# Altium footprint library CoilcraftPCB.PcbLib: 320 footprints (part 8 of 20)
Each footprint in its own frame and in the unit in brackets; x right, y up, seen from the top. Pads: shape width x height; smd on the part's side, far side on the other; paste and mask are expansions set on the pad; w line width, h text height; cw(c..) or ccw(c..) is an arc to the next point about the centre after c.
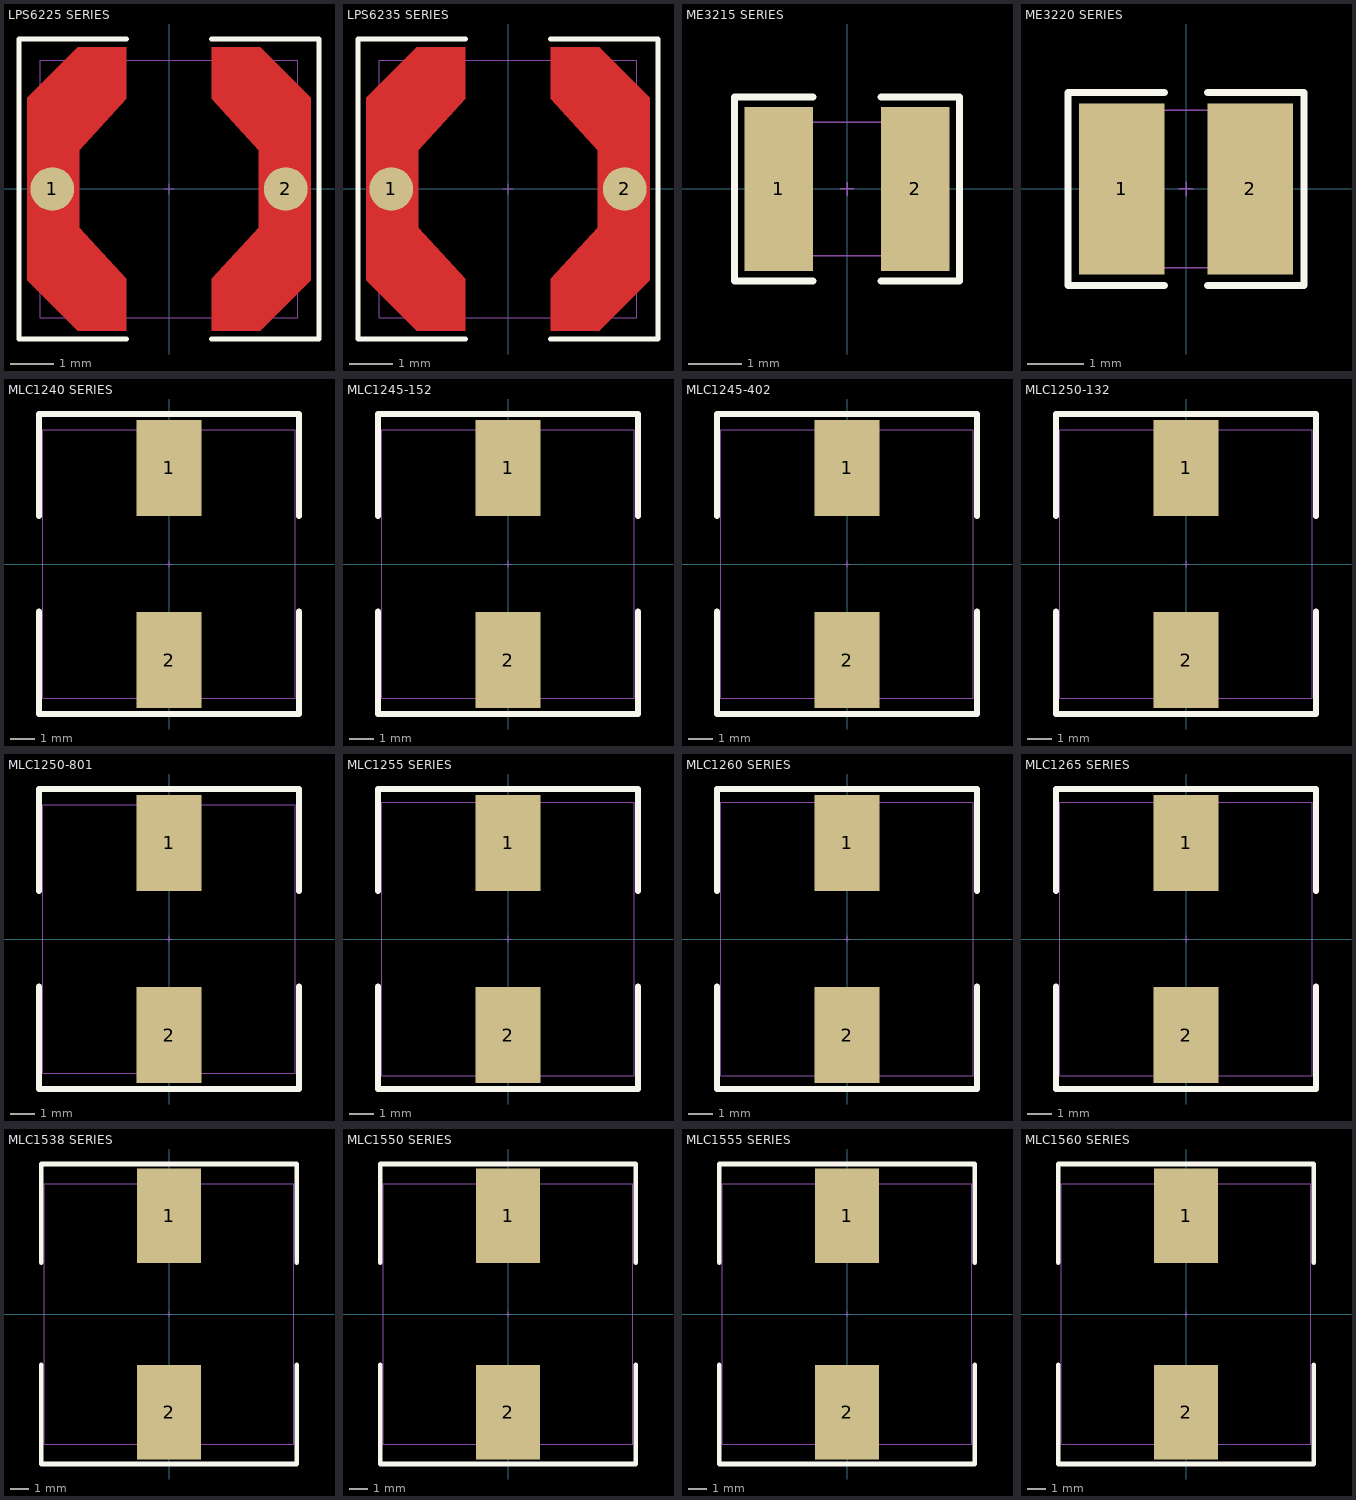
[diagram p7: the footprints below, top view; thin cyan lines are the x and y axes]

## LPS6225 SERIES [mil] "Coilcraft Shielded SMT Power Inductors"
height 94
pads (2):
  round 40 smd mask+0: 1(-107,0) 2(107,0)
Top Layer:
  region: 39,82.5 39,130 83.5,130 130,83.5 130,-83.5 83.5,-130 39,-130 39,-82.5 82.5,-35.5 82.5,35.5
  region: -39,-82.5 -39,-130 -83.5,-130 -130,-83.5 -130,83.5 -83.5,130 -39,130 -39,82.5 -82.5,35.5 -82.5,-35.5
Top Overlay:
  lines w5: -39,-137.5 -137.5,-137.5 -137.5,137.5 -39,137.5 ; 39,-137.5 137.5,-137.5 137.5,137.5 39,137.5
Top Paste:
  region: -39,-82.5 -39,-130 -83.5,-130 -130,-83.5 -130,83.5 -83.5,130 -39,130 -39,82.5 -82.5,35.5 -82.5,-35.5
  region: 39,82.5 39,130 83.5,130 130,83.5 130,-83.5 83.5,-130 39,-130 39,-82.5 82.5,-35.5 82.5,35.5
Mechanical 13:
  lines w1: -5,0 5,0 ; 0,-5 0,5
Mechanical 14:
  lines w1: -118,-118 -118,118 118,118 118,-118 -118,-118
3D body: height 98.43, standoff 0, extent -122.16,-122.16 122.17,122.17

## LPS6235 SERIES [mil] "Coilcraft Shielded SMT Power Inductors"
height 138
pads (2):
  round 40 smd mask+0: 1(-107,0) 2(107,0)
Top Layer:
  region: 39,82.5 39,130 83.5,130 130,83.5 130,-83.5 83.5,-130 39,-130 39,-82.5 82.5,-35.5 82.5,35.5
  region: -39,-82.5 -39,-130 -83.5,-130 -130,-83.5 -130,83.5 -83.5,130 -39,130 -39,82.5 -82.5,35.5 -82.5,-35.5
Top Overlay:
  lines w5: -39,-137.5 -137.5,-137.5 -137.5,137.5 -39,137.5 ; 39,-137.5 137.5,-137.5 137.5,137.5 39,137.5
Top Paste:
  region: -39,-82.5 -39,-130 -83.5,-130 -130,-83.5 -130,83.5 -83.5,130 -39,130 -39,82.5 -82.5,35.5 -82.5,-35.5
  region: 39,82.5 39,130 83.5,130 130,83.5 130,-83.5 83.5,-130 39,-130 39,-82.5 82.5,-35.5 82.5,35.5
Mechanical 13:
  lines w1: -5,0 5,0 ; 0,-5 0,5
Mechanical 14:
  lines w1: -118,-118 -118,118 118,118 118,-118 -118,-118
3D body: height 137.8, standoff 0, extent -122.16,-122.16 122.17,122.17

## ME3215 SERIES [mil] "Coilcraft SMT Power Inductors"
height 61
pads (2):
  rect 50x120 smd: 1(-50,0) 2(50,0)
Top Overlay:
  lines w5: -25,-67.5 -82.5,-67.5 -82.5,67.5 -25,67.5 ; 25,-67.5 82.5,-67.5 82.5,67.5 25,67.5
Mechanical 13:
  lines w1: -5,0 5,0 ; 0,-5 0,5
Mechanical 14:
  lines w1: -63,-49 -63,49 63,49 63,-49 -63,-49
3D body: height 61.06, standoff 0.03, extent -68.9,-49.21 68.89,49.22

## ME3220 SERIES [mil] "Coilcraft SMT Power Inductors"
height 79
pads (2):
  rect 60x120 smd: 1(-45,0) 2(45,0)
Top Overlay:
  lines w5: -15,-67.5 -82.5,-67.5 -82.5,67.5 -15,67.5 ; 15,-67.5 82.5,-67.5 82.5,67.5 15,67.5
Mechanical 13:
  lines w1: -5,0 5,0 ; 0,-5 0,5
Mechanical 14:
  lines w1: -63,-55 -63,55 63,55 63,-55 -63,-55
3D body: height 94.52, standoff 0.03, extent -68.9,-55.11 68.89,55.12

## MLC1240 SERIES [mm] "Coilcraft Shielded Power Inductors"
height 4.1
pads (2):
  rect 2.7x4 smd: 1(0,4) 2(0,-4)
Top Overlay:
  lines w0.254: -5.41,-1.981 -5.41,-6.248 5.41,-6.248 5.41,-1.981 ; -5.41,2.007 -5.41,6.248 5.41,6.248 5.41,2.007
Mechanical 13:
  lines w0.025: -0.127,0 0.127,0 ; 0,-0.127 0,0.127
Mechanical 14:
  lines w0.025: -5.25,-5.6 5.25,-5.6 5.25,5.6 -5.25,5.6 -5.25,-5.6
3D body: height 4.03, standoff 0.02, extent -5.25,-5.6 5.25,5.6

## MLC1245-152 [mm] "Coilcraft Shielded Power Inductors"
height 4.6
pads (2):
  rect 2.7x4 smd: 1(0,4) 2(0,-4)
Top Overlay:
  lines w0.254: -5.41,-1.981 -5.41,-6.248 5.41,-6.248 5.41,-1.981 ; -5.41,2.007 -5.41,6.248 5.41,6.248 5.41,2.007
Mechanical 13:
  lines w0.025: -0.127,0 0.127,0 ; 0,-0.127 0,0.127
Mechanical 14:
  lines w0.025: -5.25,-5.6 5.25,-5.6 5.25,5.6 -5.25,5.6 -5.25,-5.6
3D body: height 4.53, standoff 0.02, extent -5.25,-5.6 5.25,5.6

## MLC1245-402 [mm] "Coilcraft Shielded Power Inductors"
height 4.8
pads (2):
  rect 2.7x4 smd: 1(0,4) 2(0,-4)
Top Overlay:
  lines w0.254: -5.41,-1.981 -5.41,-6.248 5.41,-6.248 5.41,-1.981 ; -5.41,2.007 -5.41,6.248 5.41,6.248 5.41,2.007
Mechanical 13:
  lines w0.025: -0.127,0 0.127,0 ; 0,-0.127 0,0.127
Mechanical 14:
  lines w0.025: -5.25,-5.6 -5.25,5.6 5.25,5.6 5.25,-5.6 -5.25,-5.6
3D body: height 4.53, standoff 0.02, extent -5.25,-5.6 5.25,5.6

## MLC1250-132 [mm] "Coilcraft Shielded Power Inductors"
height 5.3
pads (2):
  rect 2.7x4 smd: 1(0,4) 2(0,-4)
Top Overlay:
  lines w0.254: -5.41,-1.981 -5.41,-6.248 5.41,-6.248 5.41,-1.981 ; -5.41,2.007 -5.41,6.248 5.41,6.248 5.41,2.007
Mechanical 13:
  lines w0.025: -0.127,0 0.127,0 ; 0,-0.127 0,0.127
Mechanical 14:
  lines w0.025: -5.25,-5.6 5.25,-5.6 5.25,5.6 -5.25,5.6 -5.25,-5.6
3D body: height 5.03, standoff 0.02, extent -5.25,-5.6 5.25,5.6

## MLC1250-801 [mm] "Coilcraft Shielded Power Inductors"
height 5.1
pads (2):
  rect 2.7x4 smd: 1(0,4) 2(0,-4)
Top Overlay:
  lines w0.254: -5.41,-1.981 -5.41,-6.248 5.41,-6.248 5.41,-1.981 ; -5.41,2.007 -5.41,6.248 5.41,6.248 5.41,2.007
Mechanical 13:
  lines w0.025: -0.127,0 0.127,0 ; 0,-0.127 0,0.127
Mechanical 14:
  lines w0.025: -5.25,-5.6 5.25,-5.6 5.25,5.6 -5.25,5.6 -5.25,-5.6
3D body: height 5.03, standoff 0.02, extent -5.25,-5.6 5.25,5.6

## MLC1255 SERIES [mm] "Coilcraft Shielded Power Inductors"
height 5.6
pads (2):
  rect 2.7x4 smd: 1(0,4) 2(0,-4)
Top Overlay:
  lines w0.254: -5.41,-1.981 -5.41,-6.248 5.41,-6.248 5.41,-1.981 ; -5.41,2.007 -5.41,6.248 5.41,6.248 5.41,2.007
Mechanical 13:
  lines w0.025: -0.127,0 0.127,0 ; 0,-0.127 0,0.127
Mechanical 14:
  lines w0.025: -5.25,-5.7 5.25,-5.7 5.25,5.7 -5.25,5.7 -5.25,-5.7
3D body: height 5.53, standoff 0.02, extent -5.25,-5.7 5.25,5.7

## MLC1260 SERIES [mm] "Coilcraft Shielded Power Inductors"
height 6.1
pads (2):
  rect 2.7x4 smd: 1(0,4) 2(0,-4)
Top Overlay:
  lines w0.254: -5.41,-1.981 -5.41,-6.248 5.41,-6.248 5.41,-1.981 ; -5.41,2.007 -5.41,6.248 5.41,6.248 5.41,2.007
Mechanical 13:
  lines w0.025: -0.127,0 0.127,0 ; 0,-0.127 0,0.127
Mechanical 14:
  lines w0.025: -5.25,-5.7 5.25,-5.7 5.25,5.7 -5.25,5.7 -5.25,-5.7
3D body: height 6.03, standoff 0.02, extent -5.25,-5.7 5.25,5.7

## MLC1265 SERIES [mm] "Coilcraft Shielded Power Inductors"
height 6.5
pads (2):
  rect 2.7x4 smd: 1(0,4) 2(0,-4)
Top Overlay:
  lines w0.254: -5.41,-1.981 -5.41,-6.248 5.41,-6.248 5.41,-1.981 ; -5.41,2.007 -5.41,6.248 5.41,6.248 5.41,2.007
Mechanical 13:
  lines w0.025: -0.127,0 0.127,0 ; 0,-0.127 0,0.127
Mechanical 14:
  lines w0.025: -5.25,-5.7 5.25,-5.7 5.25,5.7 -5.25,5.7 -5.25,-5.7
3D body: height 6.43, standoff 0.02, extent -5.25,-5.7 5.25,5.7

## MLC1538 SERIES [mm] "Coilcraft Shielded Power Inductors"
height 3.9
pads (2):
  rect 3.4x5 smd: 1(0,5.2) 2(0,-5.2)
Top Overlay:
  lines w0.254: -6.769,-2.692 -6.769,-7.95 6.769,-7.95 6.769,-2.692 ; -6.769,2.718 -6.769,7.95 6.769,7.95 6.769,2.718
Mechanical 13:
  lines w0.025: -0.127,0 0.127,0 ; 0,-0.127 0,0.127
Mechanical 14:
  lines w0.025: -6.6,-6.9 6.6,-6.9 6.6,6.9 -6.6,6.9 -6.6,-6.9
3D body: height 3.83, standoff 0.02, extent -6.6,-6.9 6.6,6.9

## MLC1550 SERIES [mm] "Coilcraft Shielded Power Inductors"
height 5.2
pads (2):
  rect 3.4x5 smd: 1(0,5.2) 2(0,-5.2)
Top Overlay:
  lines w0.254: -6.769,-2.692 -6.769,-7.95 6.769,-7.95 6.769,-2.692 ; -6.769,2.718 -6.769,7.95 6.769,7.95 6.769,2.718
Mechanical 13:
  lines w0.025: -0.127,0 0.127,0 ; 0,-0.127 0,0.127
Mechanical 14:
  lines w0.025: -6.6,-6.9 -6.6,6.9 6.6,6.9 6.6,-6.9 -6.6,-6.9
3D body: height 5.13, standoff 0.02, extent -6.6,-6.9 6.6,6.9

## MLC1555 SERIES [mm] "Coilcraft Shielded Power Inductors"
height 5.6
pads (2):
  rect 3.4x5 smd: 1(0,5.2) 2(0,-5.2)
Top Overlay:
  lines w0.254: -6.769,-2.692 -6.769,-7.95 6.769,-7.95 6.769,-2.692 ; -6.769,2.718 -6.769,7.95 6.769,7.95 6.769,2.718
Mechanical 13:
  lines w0.025: -0.127,0 0.127,0 ; 0,-0.127 0,0.127
Mechanical 14:
  lines w0.025: -6.6,-6.9 6.6,-6.9 6.6,6.9 -6.6,6.9 -6.6,-6.9
3D body: height 5.53, standoff 0.02, extent -6.6,-6.9 6.6,6.9

## MLC1560 SERIES [mm] "Coilcraft Shielded Power Inductors"
height 6
pads (2):
  rect 3.4x5 smd: 1(0,5.2) 2(0,-5.2)
Top Overlay:
  lines w0.254: -6.769,-2.692 -6.769,-7.95 6.769,-7.95 6.769,-2.692 ; -6.769,2.718 -6.769,7.95 6.769,7.95 6.769,2.718
Mechanical 13:
  lines w0.025: -0.127,0 0.127,0 ; 0,-0.127 0,0.127
Mechanical 14:
  lines w0.025: -6.6,-6.9 6.6,-6.9 6.6,6.9 -6.6,6.9 -6.6,-6.9
3D body: height 6.93, standoff 0.02, extent -6.6,-6.9 6.6,6.9